# EAGLE library part 6130XX243121_613020243121 (library WR-PHD)
WR-PHD 2.54 mm Angled Dual Socket Header Article Properties Pins 4; 6; 8; 10; 12; 14; 16; 20; 22; 24; 26; 32; 34; 40; 64; 72 Material Properties Insulator Material PBT Insulator Flammability Rating UL94 V-0 Contact Material Copper Alloy Contact Plating Gold Contact Type Stamped General Information Operating Temperature -40 °C up to +105 °C Compliance Lead free / RoHS Pitch 2.54 mm Durability 25 Mating cycles Rows Dual Gender Socket Header Type Angled Electrical Properties Withstanding Voltage 500 V (AC) Contact Resistance 20 mΩ RISO 1000 MΩ CERTIFICATION UL Approval E323964 Packaging Properties Packaging Tray <https://www.we-online.com/components/media/o33216v209%20Family_WR-PHD_6130xx243121.jpg> Details see: www.we-online.com/en/components/products/PHD_2_54_ANGLED_DUAL_SOCKET_HEADER_6130XX243121 <www.we-online.com/catalog/PHD_2_54_ANGLED_DUAL_SOCKET_HEADER_6130XX243121/?utm_source=eagle_model&utm_medium=description_link&utm_campaign=eisos_eagle> Updated by Ella 2024-03-13 2024 (C) Würth Elektronik
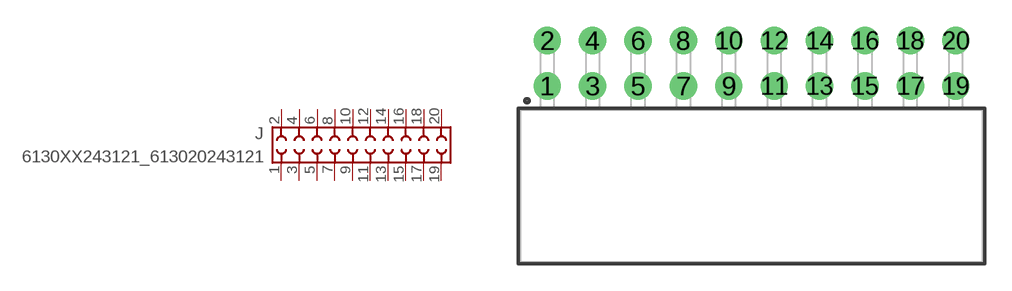
[diagram p185: symbol with the pads of 613020243121; footprint 613020243121]

Designator prefix J

## 6130XX243121_613020243121 (DATASHEET-URL: https://www.we-online.com/redexpert/spec/613020243121?ae; GENDER: Socket Header; IR: 3A; MOUNT: THT; PACKAGING: Tray; PART-NUMBER: 613020243121; PINS: 20; PITCH: 2.54 mm; ROWS: Dual; TYPE: Angled; VALUE: 613020243121)  [613020243121]
1  1  pas
2  2  pas
3  3  pas
4  4  pas
5  5  pas
6  6  pas
7  7  pas
8  8  pas
9  9  pas
10  10  pas
11  11  pas
12  12  pas
13  13  pas
14  14  pas
15  15  pas
16  16  pas
17  17  pas
18  18  pas
19  19  pas
20  20  pas

## Footprint 613020243121 (pad centres in mm)
WR-PHD 2.54 mm Angled Socket Header, 20 Pins
drill 1.02: 1 -11.43,5.61; 2 -11.43,8.15; 3 -8.89,5.61; 4 -8.89,8.15; 5 -6.35,5.61; 6 -6.35,8.15; 7 -3.81,5.61; 8 -3.81,8.15; 9 -1.27,5.61; 10 -1.27,8.15; 11 1.27,5.61; 12 1.27,8.15; 13 3.81,5.61; 14 3.81,8.15; 15 6.35,5.61; 16 6.35,8.15; 17 8.89,5.61; 18 8.89,8.15; 19 11.43,5.61; 20 11.43,8.15